# Altium footprint library BAS40W-7-F.PcbLib: 3 footprints
Each footprint in its own frame and in the unit in brackets; x right, y up, seen from the top. Pads: shape width x height; smd on the part's side, far side on the other; paste and mask are expansions set on the pad; w line width, h text height; cw(c..) or ccw(c..) is an arc to the next point about the centre after c.
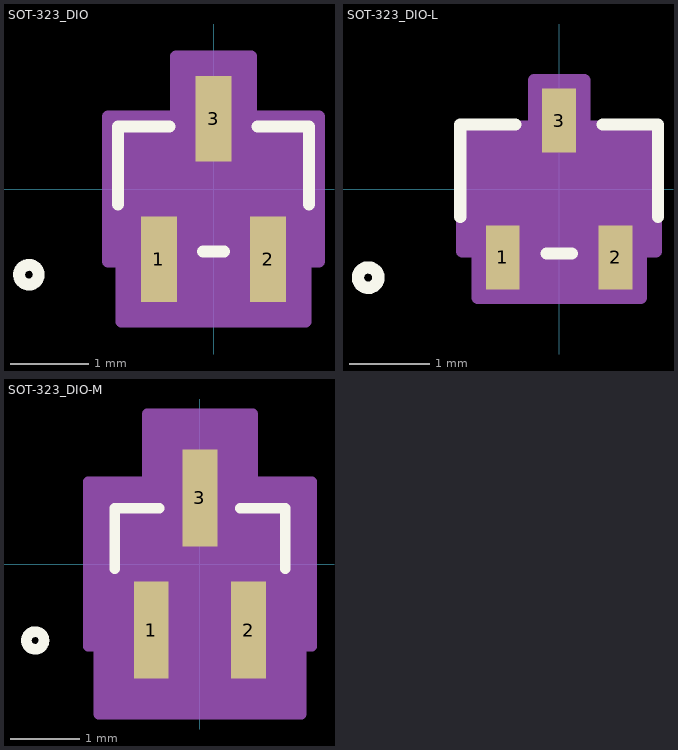
[diagram p0: the footprints below, top view; thin cyan lines are the x and y axes]

## SOT-323_DIO [mm]
pads (3):
  rect 0.46x1.1 smd paste+0 mask+0: 1(-0.7,-0.9) 2(0.7,-0.9) 3(0,0.9)
Top Overlay:
  circle w0.152: c-2.37,-1.1 r0.127
  lines w0.152: -1.227,-0.2 -1.227,0.802 -0.563,0.802 ; -0.137,-0.802 0.137,-0.802 ; 0.563,0.802 1.227,0.802 1.227,-0.2
  text ".Designator" at -3.492,-0.635 h1.27
Mechanical 13:
  circle w0.025: c-0.846,-0.421 r0.127
  lines w0.025: -1.1,-0.675 1.1,-0.675 1.1,0.675 -1.1,0.675 -1.1,-0.675 ; -0.9,-1.1 -0.9,-0.675 -0.5,-0.675 -0.5,-1.1 -0.9,-1.1 ; -0.2,0.675 0.2,0.675 0.2,1.1 -0.2,1.1 -0.2,0.675 ; 0.5,-1.1 0.5,-0.675 0.9,-0.675 0.9,-1.1 0.5,-1.1
  text ".Designator" at -3.492,-0.635 h1.27
Mechanical 15:
  region: -1.354,-0.929 -1.354,0.929 -0.484,0.929 -0.484,1.704 0.484,1.704 0.484,0.929 1.354,0.929 1.354,-0.929 1.184,-0.929 1.184,-1.704 -1.184,-1.704 -1.184,-0.929
  region: 1.1,-0.675 -1.1,-0.675 -1.1,0.675 1.1,0.675
  lines w0.152: -1.354,-0.929 -1.354,0.929 -0.484,0.929 -0.484,1.704 0.484,1.704 0.484,0.929 1.354,0.929 1.354,-0.929 1.184,-0.929 1.184,-1.704 -1.184,-1.704 -1.184,-0.929 -1.354,-0.929
3D body "SOT-323_DIO.step": height 1, standoff 0, extent -1.1,-1.1 1.1,1.1

## SOT-323_DIO-L [mm]
pads (3):
  rect 0.42x0.8 smd paste+0 mask+0: 1(-0.7,-0.85) 2(0.7,-0.85) 3(0,0.85)
Top Overlay:
  circle w0.152: c-2.37,-1.1 r0.127
  lines w0.152: -1.227,-0.349 -1.227,0.802 -0.543,0.802 ; -0.157,-0.802 0.157,-0.802 ; 0.543,0.802 1.227,0.802 1.227,-0.349
  text ".Designator" at -3.492,-0.635 h1.27
Mechanical 13:
  circle w0.025: c-0.846,-0.421 r0.127
  lines w0.025: -1.1,-0.675 1.1,-0.675 1.1,0.675 -1.1,0.675 -1.1,-0.675 ; -0.9,-1.1 -0.9,-0.675 -0.5,-0.675 -0.5,-1.1 -0.9,-1.1 ; -0.2,0.675 0.2,0.675 0.2,1.1 -0.2,1.1 -0.2,0.675 ; 0.5,-1.1 0.5,-0.675 0.9,-0.675 0.9,-1.1 0.5,-1.1
  text ".Designator" at -3.492,-0.635 h1.27
Mechanical 15:
  region: -1.202,-0.777 -1.202,0.777 -0.312,0.777 -0.312,1.352 0.312,1.352 0.312,0.777 1.202,0.777 1.202,-0.777 1.012,-0.777 1.012,-1.352 -1.012,-1.352 -1.012,-0.777
  region: 1.1,-0.675 -1.1,-0.675 -1.1,0.675 1.1,0.675
  lines w0.152: -1.202,-0.777 -1.202,0.777 -0.312,0.777 -0.312,1.352 0.312,1.352 0.312,0.777 1.202,0.777 1.202,-0.777 1.012,-0.777 1.012,-1.352 -1.012,-1.352 -1.012,-0.777 -1.202,-0.777
3D body "SOT-323_DIO.step": height 1, standoff 0, extent -1.1,-1.1 1.1,1.1

## SOT-323_DIO-M [mm]
pads (3):
  rect 0.5x1.4 smd paste+0 mask+0: 1(-0.7,-0.95) 2(0.7,-0.95) 3(0,0.95)
Top Overlay:
  circle w0.152: c-2.37,-1.1 r0.127
  lines w0.152: -1.227,-0.066 -1.227,0.802 -0.583,0.802 ; 0.583,0.802 1.227,0.802 1.227,-0.066
  text ".Designator" at -3.492,-0.635 h1.27
Mechanical 13:
  circle w0.025: c-0.846,-0.421 r0.127
  lines w0.025: -1.1,-0.675 1.1,-0.675 1.1,0.675 -1.1,0.675 -1.1,-0.675 ; -0.9,-1.1 -0.9,-0.675 -0.5,-0.675 -0.5,-1.1 -0.9,-1.1 ; -0.2,0.675 0.2,0.675 0.2,1.1 -0.2,1.1 -0.2,0.675 ; 0.5,-1.1 0.5,-0.675 0.9,-0.675 0.9,-1.1 0.5,-1.1
  text ".Designator" at -3.492,-0.635 h1.27
Mechanical 15:
  region: -1.608,-1.183 -1.608,1.183 -0.758,1.183 -0.758,2.158 0.758,2.158 0.758,1.183 1.608,1.183 1.608,-1.183 1.458,-1.183 1.458,-2.158 -1.458,-2.158 -1.458,-1.183
  region: 1.1,-0.675 -1.1,-0.675 -1.1,0.675 1.1,0.675
  lines w0.152: -1.608,-1.183 -1.608,1.183 -0.758,1.183 -0.758,2.158 0.758,2.158 0.758,1.183 1.608,1.183 1.608,-1.183 1.458,-1.183 1.458,-2.158 -1.458,-2.158 -1.458,-1.183 -1.608,-1.183
3D body "SOT-323_DIO.step": height 1, standoff 0, extent -1.1,-1.1 1.1,1.1